# Altium footprint library Diode.PcbLib: 35 footprints (part 3 of 3)
Each footprint in its own frame and in the unit in brackets; x right, y up, seen from the top. Pads: shape width x height; smd on the part's side, far side on the other; paste and mask are expansions set on the pad; w line width, h text height; cw(c..) or ccw(c..) is an arc to the next point about the centre after c.
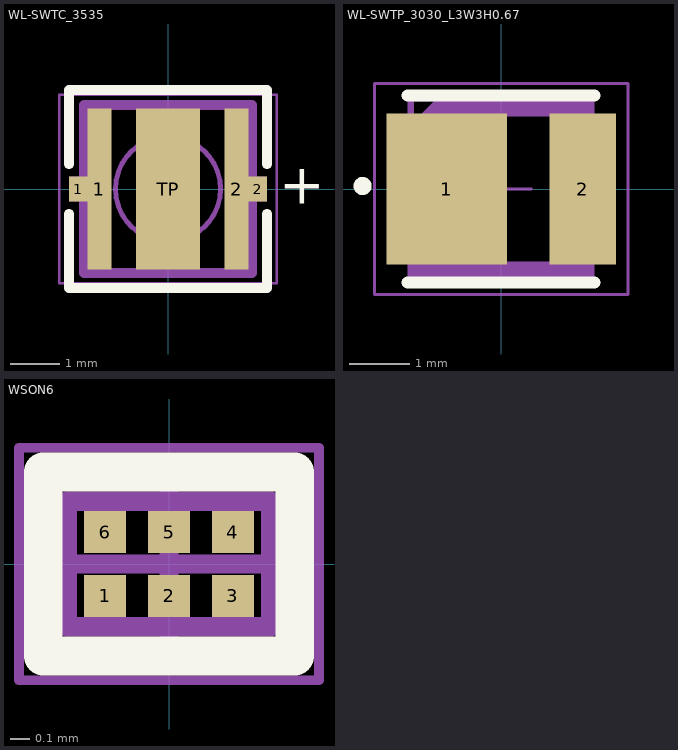
[diagram p2: the footprints below, top view; thin cyan lines are the x and y axes]

## WL-SWTC_3535 [mm] "SMD White Top view Ceramic LED, body 3.4x3.4mm"
height 2.1
pads (5):
  rect 0.375x0.5 smd: 1(-1.813,0) 2(1.813,0)
  rect 0.48x3.25 smd: 1(-1.385,0) 2(1.385,0)
  rect 1.3x3.25 smd: TP(0,0)
Top Overlay:
  lines w0.2: -2,-0.5 -2,-2 2,-2 2,-0.5 ; -2,0.5 -2,2 2,2 2,0.5
  text "+" at 2.25,-0.3 h0.8
Top Assembly (Mech13):
  circle w0.1: c0,0 r1.061
  region: -1.7,0.25 -2,0.25 -2,-0.25 -1.7,-0.25
  rectangle: 1.7,-0.25 2,0.25
  lines w0.2: -1.7,-1.7 -1.7,1.7 1.7,1.7 1.7,-1.7 -1.7,-1.7
  text ".Designator" at -2.499,-0.167 h0.5
Mechanical 15:
  lines w0.05: -0.5,0 0.5,0 ; 0,-0.5 0,0.5 ; -2.2,-1.9 2.2,-1.9 2.2,1.9 -2.2,1.9 -2.2,-1.9
3D body "150353xS75400.stp": height 2.1, standoff 0, extent -1.7,-1.7 1.7,1.7

## WL-SWTP_3030_L3W3H0.67 [mm] "SMD White Top view PLCC, body 3x3mm"
height 0.67
pads (2):
  rect 2x2.5 smd: 1(-0.9,0)
  rect 1.1x2.5 smd: 2(1.35,0)
Top Overlay:
  circle w0.15: c-2.3,0.05 r0.075
  lines w0.2: -1.55,-1.55 1.55,-1.55 ; -1.55,1.55 1.55,1.55
Top Assembly (Mech13):
  rectangle: -1.5,-1.5 1.531,-1.246
  rectangle: 1.233,-1.5 1.5,1.489
  rectangle: -1.5,-1.5 -1.232,1.086
  rectangle: -1.107,1.26 1.5,1.5
  rectangle: 1.154,-1.273 1.258,-1.17
  rectangle: -1.243,-1.256 -1.148,-1.171
  rectangle: 1.136,1.175 1.25,1.289
  rectangle: -1.353,1.068 -1.203,1.196
  rectangle: -1.239,1.191 -1.095,1.325
  lines w0.1: -1.5,1 -1,1.5 ; -1.5,-1.5 1.5,-1.5 1.5,1.5 -1.5,1.5 -1.5,-1.5 ; -1.25,-0.996 ccw(c-0.996,-0.996) -0.996,-1.25 0.996,-1.25 ccw(c0.996,-0.996) 1.25,-0.996 1.25,0.996 ccw(c0.996,0.996) 0.996,1.25 -0.996,1.25 ccw(c-0.996,0.996) -1.25,0.996 -1.25,-0.996
  text ".Designator" at -3.499,-0.233 h0.7
Mechanical 15:
  lines w0.05: -0.5,0 0.5,0 ; 0,-0.5 0,0.5 ; -2.1,-1.75 -2.1,1.75 2.1,1.75 2.1,-1.75 -2.1,-1.75
3D body "1583032xxA.stp": height 0.67, standoff 0, extent -1.6,-1.5 1.6,1.5

## WSON6 [mm]
pads (6):
  rect 0.216x0.216 smd: 1(-0.33,-0.165) 2(0,-0.165) 3(0.33,-0.165) 4(0.33,0.165) 5(0,0.165) 6(-0.33,0.165)
Top Overlay:
  lines w0.2: -0.65,-0.475 0.65,-0.475 0.65,0.475 -0.65,0.475 -0.65,-0.475
Top Assembly (Mech13):
  circle w0.05: c-0.33,-0.165 r0.071
  lines w0.1: -0.525,-0.325 0.525,-0.325 0.525,0.325 -0.525,0.325 -0.525,-0.325
  text ".Designator" at -1.5,0.75 h0.3
Mechanical 15:
  lines w0.05: -0.775,-0.6 -0.775,0.6 0.775,0.6 0.775,-0.6 -0.775,-0.6
  lines w0.1: -0.5,0 0.5,0 ; 0,-0.5 0,0.5
3D body "SP1012-05WTG v0.step": height 0.36, standoff 0.01, extent -0.47,-0.305 0.47,0.305